# EAGLE library part CON_FPC_2-1734592-4 (library dp_devices.v6)
24 pins 0.5mm pitch FPC Flexible Printed Circuit Connector http://www.te.com/catalog/pn/en/2-1734592-4
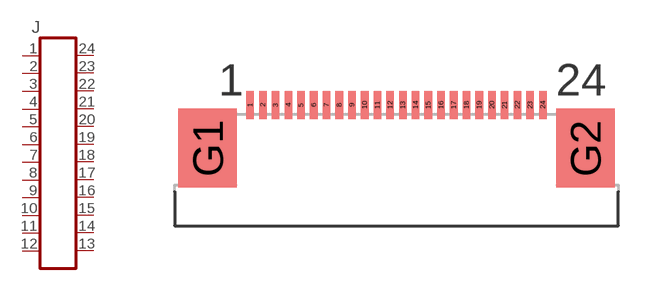
[diagram p164: symbol with the pads of FFC_2-1734592-4; footprint FFC_2-1734592-4]

Designator prefix J

## CON_FPC_2-1734592-4  [FFC_2-1734592-4]
1  1  pas
2  2  pas
3  3  pas
4  4  pas
5  5  pas
6  6  pas
7  7  pas
8  8  pas
9  9  pas
10  10  pas
11  11  pas
12  12  pas
13  13  pas
14  14  pas
15  15  pas
16  16  pas
17  17  pas
18  18  pas
19  19  pas
20  20  pas
21  21  pas
22  22  pas
23  23  pas
24  24  pas

## Footprint FFC_2-1734592-4 (pad centres in mm)
FFC connector from TE 2-1734592-4
smd 0.3 x 1.1: 1 -5.75,2.55; 2 -5.25,2.55; 3 -4.75,2.55; 4 -4.25,2.55; 5 -3.75,2.55; 6 -3.25,2.55; 7 -2.75,2.55; 8 -2.25,2.55; 9 -1.75,2.55; 10 -1.25,2.55; 11 -0.75,2.55; 12 -0.25,2.55; 13 0.25,2.55; 14 0.75,2.55; 15 1.25,2.55; 16 1.75,2.55; 17 2.25,2.55; 18 2.75,2.55; 19 3.25,2.55; 20 3.75,2.55; 21 4.25,2.55; 22 4.75,2.55; 23 5.25,2.55; 24 5.75,2.55
smd 2.3 x 3.1: G1 -7.42,0.85; G2 7.42,0.85